# Altium footprint library Tree_Footprints.PcbLib: 4 footprints
Each footprint in its own frame and in the unit in brackets; x right, y up, seen from the top. Pads: shape width x height; smd on the part's side, far side on the other; paste and mask are expansions set on the pad; w line width, h text height; cw(c..) or ccw(c..) is an arc to the next point about the centre after c.
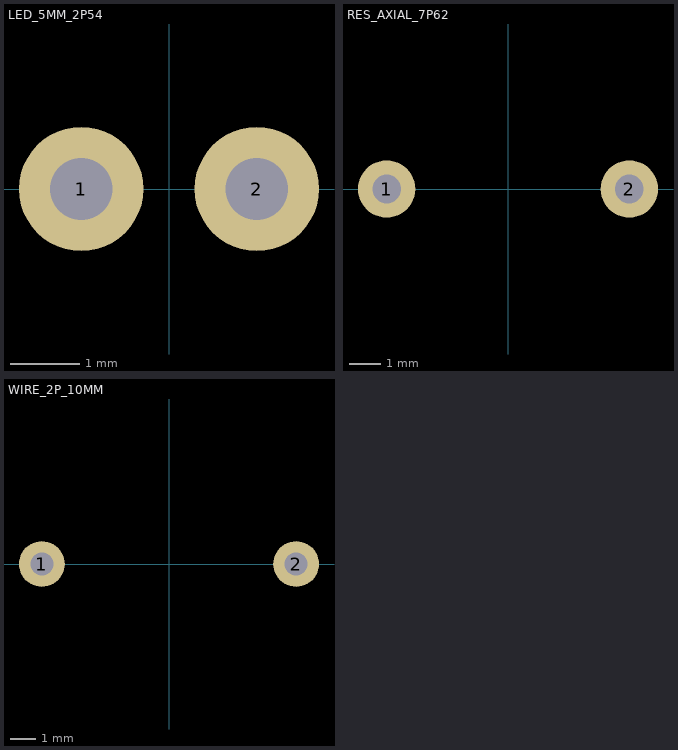
[diagram p0: the footprints below, top view; thin cyan lines are the x and y axes]

## LED_5MM_2P54 [mm]
pads (2):
  round 1.8 hole 0.9: 1(-1.27,0) 2(1.27,0)

## PCBComponent_1 [mm]

## RES_AXIAL_7P62 [mm]
pads (2):
  round 1.8 hole 0.9: 1(-3.81,0) 2(3.81,0)

## WIRE_2P_10MM [mm]
pads (2):
  round 1.8 hole 0.9: 1(-5,0) 2(5,0)